# Altium schematic symbol library TPS3700DDCR.SchLib: 1 symbol
Pins are listed as number, name and electrical type; pins without a type are passive.

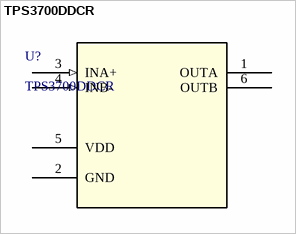
[diagram p0: symbol TPS3700DDCR]

## TPS3700DDCR
designator U?
High-voltage (18-V) window voltage detector for overvoltage and undervoltage monitoring 6-SOT-23-THIN -40 to 125; Manufacturer_Name: Texas Instruments; Copyright: Copyright (C) 2026 Ultra Librarian. All rights reserved.; Manufacturer_Part_Number: TPS3700DDCR; RefDes: RefDes; Type: Type
footprint DDC6_TEX
pins: 1 OUTA (oc), 2 GND (power), 3 INA+ (in), 4 INB- (in), 5 VDD (power), 6 OUTB (oc)